# Altium footprint library Diode.PcbLib: 66 footprints (part 5 of 5)
Each footprint in its own frame and in the unit in brackets; x right, y up, seen from the top. Pads: shape width x height; smd on the part's side, far side on the other; paste and mask are expansions set on the pad; w line width, h text height; cw(c..) or ccw(c..) is an arc to the next point about the centre after c.
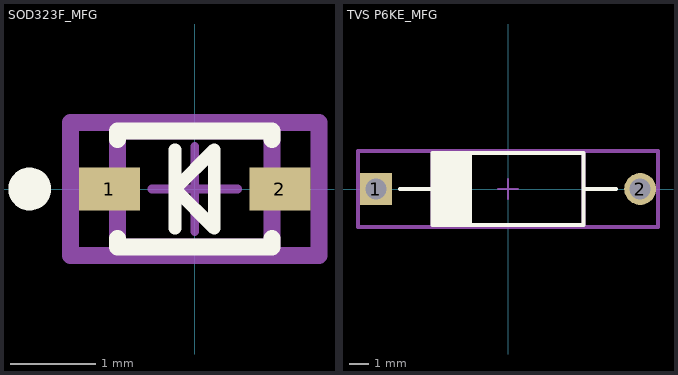
[diagram p4: the footprints below, top view; thin cyan lines are the x and y axes]

## SOD323F_MFG [mm]
pads (2):
  rect 0.71x0.5 smd paste+0 mask+0: 1(-0.995,0) 2(0.995,0)
Top Overlay:
  circle w0.25: c-1.925,0 r0.125
  lines w0.15: -0.229,-0.457 -0.229,0.457 ; -0.229,0 0.229,-0.457 0.229,0.457 -0.229,0
  lines w0.2: -0.9,-0.577 -0.9,-0.675 0.9,-0.675 0.9,-0.577 ; -0.9,0.577 -0.9,0.675 0.9,0.675 0.9,0.577
Top Designator:
  text ".Designator" at -4.023,-0.344 h1.52
Mechanical 10:
  lines w0.2: -1.45,-0.775 -1.45,0.775 1.45,0.775 1.45,-0.775 -1.45,-0.775
Mechanical 12:
  lines w0.2: -0.9,-0.675 -0.9,0.675 0.9,0.675 0.9,-0.675 -0.9,-0.675
Mechanical 15:
  lines w0.1: -0.5,0 0.5,0 ; 0,-0.5 0,0.5
  lines w0.2: -1.45,-0.775 -1.45,0.775 1.45,0.775 1.45,-0.775 -1.45,-0.775
3D body "Diode_Diodes_Inc._1N4148WSF-7_eec.STEP": height 0.75, standoff 0, extent -1.264,-0.62 1.236,0.63

## TVS P6KE_MFG [mm]
pads (2):
  rect 1.6x1.6 hole 1.05 paste-2539.97 mask+0: 1(-6.638,0)
  round 1.6 hole 1.05 paste-2539.97 mask+0: 2(6.638,0)
Top Overlay:
  rectangle: -3.8,-1.73 -1.9,1.8
  lines w0.2: -5.438,0 -3.8,0 ; -1.9,-1.73 -1.9,1.73 ; 3.8,0 5.438,0 ; -3.8,-1.8 -3.8,1.8 3.8,1.8 3.8,-1.8 -3.8,-1.8
Top Designator:
  text ".Designator" at -3.71,-0.344 h1.52
Mechanical 10:
  lines w0.2: -7.538,-1.9 -7.538,1.9 7.538,1.9 7.538,-1.9 -7.538,-1.9
Mechanical 12:
  lines w0.2: -3.8,-1.8 -3.8,1.8 3.8,1.8 3.8,-1.8 -3.8,-1.8
Mechanical 15:
  lines w0.1: -0.5,0 0.5,0 ; 0,-0.5 0,0.5
  lines w0.2: -7.538,-1.9 -7.538,1.9 7.538,1.9 7.538,-1.9 -7.538,-1.9
3D body "Diode_Littelfuse_Inc_P6KE6_8A_eec.STEP": height 3.6, standoff -4, extent -7.028,-1.8 7.028,1.8